# Altium footprint library Connector Header 254.PcbLib: 156 footprints (part 1 of 11)
Each footprint in its own frame and in the unit in brackets; x right, y up, seen from the top. Pads: shape width x height; smd on the part's side, far side on the other; paste and mask are expansions set on the pad; w line width, h text height; cw(c..) or ccw(c..) is an arc to the next point about the centre after c.
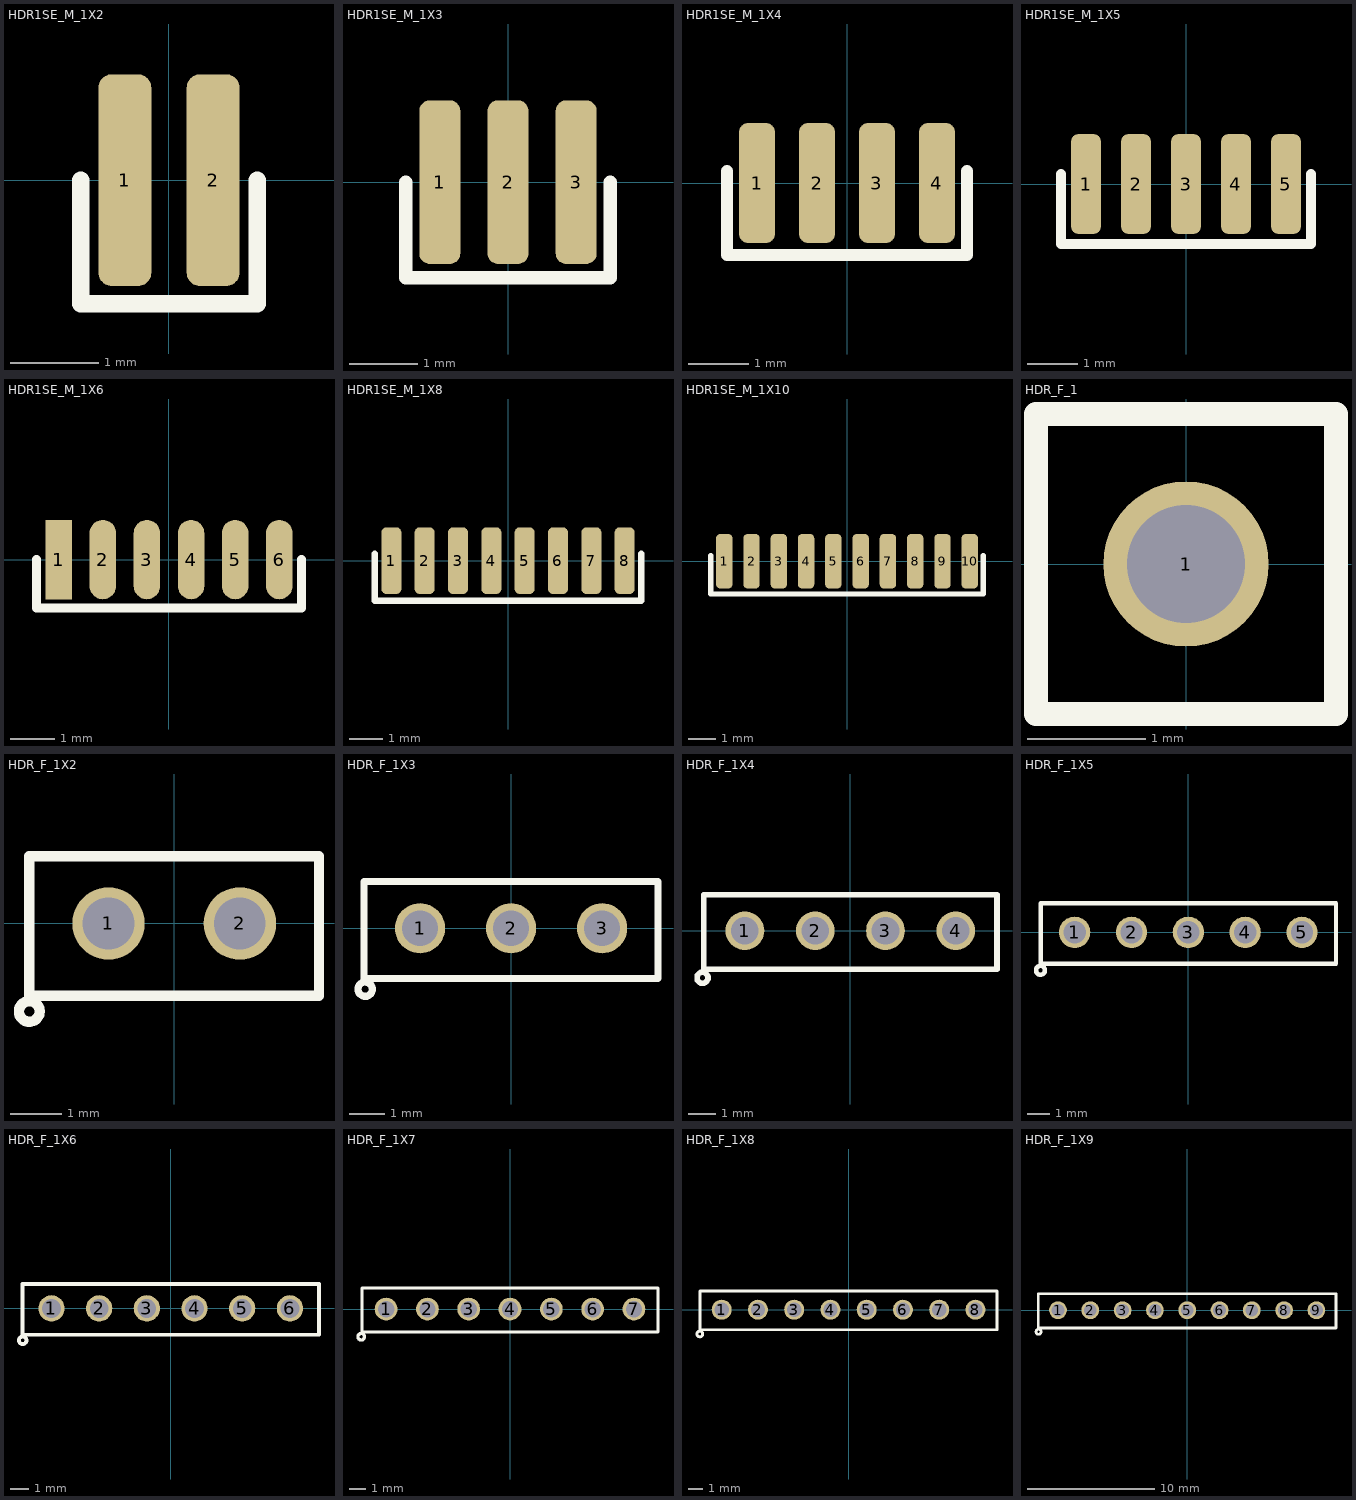
[diagram p0: the footprints below, top view; thin cyan lines are the x and y axes]

## HDR1SE_M_1X2 [mm] "HEADER, 1mm, test, SMD"
pads (2):
  rrect50% 0.6x2.4 smd mask+0.1: 1(-0.5,0) 2(0.5,0)
TopOverlay:
  lines w0.2: -1,0 -1,-1.4 1,-1.4 1,0

## HDR1SE_M_1X3 [mm] "HEADER, 1mm, test, SMD"
pads (3):
  rrect50% 0.6x2.4 smd mask+0.1: 1(-1,0) 2(0,0) 3(1,0)
TopOverlay:
  lines w0.2: -1.5,0 -1.5,-1.4 1.5,-1.4 1.5,0

## HDR1SE_M_1X4 [mm] "HEADER, 1mm, test, SMD"
pads (4):
  rrect50% 0.6x2 smd mask+0.1: 1(-1.5,0) 2(-0.5,0) 3(0.5,0) 4(1.5,0)
TopOverlay:
  lines w0.2: -2,0.2 -2,-1.2 2,-1.2 2,0.2

## HDR1SE_M_1X5 [mm] "HEADER, 1mm, test, SMD"
pads (5):
  rrect50% 0.6x2 smd mask+0.1: 1(-2,0) 2(-1,0) 3(0,0) 4(1,0) 5(2,0)
TopOverlay:
  lines w0.2: -2.5,0.2 -2.5,-1.2 2.5,-1.2 2.5,0.2

## HDR1SE_M_1X6 [mm] "1mm"
pads (6):
  rect 0.6x1.8 smd mask+0.1: 1(-2.5,0)
  oval 0.6x1.8 smd mask+0.1: 2(-1.5,0) 3(-0.5,0) 4(0.5,0) 5(1.5,0) 6(2.5,0)
TopOverlay:
  lines w0.2: -3,0 -3,-1.1 3,-1.1 3,0

## HDR1SE_M_1X8 [mm] "HEADER, 1mm, test, SMD"
pads (8):
  rrect50% 0.6x2 smd mask+0.1: 1(-3.5,0) 2(-2.5,0) 3(-1.5,0) 4(-0.5,0) 5(0.5,0) 6(1.5,0) 7(2.5,0) 8(3.5,0)
TopOverlay:
  lines w0.2: -4,0.2 -4,-1.2 4,-1.2 4,0.2

## HDR1SE_M_1X10 [mm] "HEADER, 1mm, test, SMD"
pads (10):
  rrect50% 0.6x2 smd mask+0.1: 1(-4.5,0) 2(-3.5,0) 3(-2.5,0) 4(-1.5,0) 5(-0.5,0) 6(0.5,0) 7(1.5,0) 8(2.5,0) 9(3.5,0) 10(4.5,0)
TopOverlay:
  lines w0.2: -5,0.2 -5,-1.2 5,-1.2 5,0.2

## HDR_F_1 [mm] "Connector; Header; 1 Position"
height 8
pads (1):
  round 1.4 / inner round 1.4 / far side oval 1.4x2.2 hole 1: 1(0,0)
TopOverlay:
  lines w0.2: -1.27,-1.27 -1.27,1.27 1.27,1.27 1.27,-1.27 -1.27,-1.27
3D body "PBS-1.stp": height 8.5, standoff -3.15, extent -1.27,-1.27 1.27,1.27

## HDR_F_1X2 [mm] "HEADER FEMALE pitch: 2.54mm"
pads (2):
  round 1.4 / inner round 1.4 / far side oval 1.4x2.2 hole 1 mask+0.1: 1(-1.27,0) 2(1.27,0)
TopOverlay:
  circle w0.2: c-2.8,-1.7 r0.2
  lines w0.2: -2.8,-1.4 2.8,-1.4 2.8,1.3 -2.8,1.3 -2.8,-1.4
3D body "female_header_a-bl254-eg-g02d.stp": height 8.5, standoff -3.2, extent -2.665,-1.3 2.665,1.2

## HDR_F_1X3 [mm] "HEADER FEMALE pitch: 2.54mm"
pads (3):
  round 1.4 / inner round 1.4 / far side oval 1.4x2.2 hole 1 mask+0.1: 1(-2.54,0) 2(0,0) 3(2.54,0)
TopOverlay:
  circle w0.2: c-4.07,-1.7 r0.2
  lines w0.2: -4.1,-1.4 -4.1,1.3 4.1,1.3 4.1,-1.4 -4.1,-1.4
3D body "female_header_a-bl254-eg-g03d.stp": height 8.5, standoff -3.2, extent -3.935,-1.3 3.935,1.2

## HDR_F_1X4 [mm] "HEADER FEMALE pitch: 2.54mm"
pads (4):
  round 1.4 / inner round 1.4 / far side oval 1.4x2.2 hole 1 mask+0.1: 1(-3.81,0) 2(-1.27,0) 3(1.27,0) 4(3.81,0)
TopOverlay:
  circle w0.2: c-5.34,-1.7 r0.2
  lines w0.2: -5.3,-1.4 5.3,-1.4 5.3,1.3 -5.3,1.3 -5.3,-1.4
3D body "female_header_a-bl254-eg-g02d.stp": height 8.5, standoff -3.2, extent -0.125,-1.3 5.205,1.2
3D body "female_header_a-bl254-eg-g02d.stp": height 8.5, standoff -3.2, extent -5.205,-1.3 0.125,1.2

## HDR_F_1X5 [mm] "HEADER FEMALE pitch: 2.54mm"
pads (5):
  round 1.4 / inner round 1.4 / far side oval 1.4x2.2 hole 1 mask+0.1: 1(-5.08,0) 2(-2.54,0) 3(0,0) 4(2.54,0) 5(5.08,0)
TopOverlay:
  circle w0.2: c-6.61,-1.7 r0.2
  lines w0.2: -6.6,-1.4 6.6,-1.4 6.6,1.3 -6.6,1.3 -6.6,-1.4
3D body "female_header_a-bl254-eg-g02d.stp": height 8.5, standoff -3.2, extent 1.145,-1.3 6.475,1.2
3D body "female_header_a-bl254-eg-g03d.stp": height 8.5, standoff -3.2, extent -6.475,-1.3 1.395,1.2

## HDR_F_1X6 [mm] "HEADER FEMALE pitch: 2.54mm"
pads (6):
  round 1.4 / inner round 1.4 / far side oval 1.4x2.2 hole 1 mask+0.1: 1(-6.35,0) 2(-3.81,0) 3(-1.27,0) 4(1.27,0) 5(3.81,0) 6(6.35,0)
TopOverlay:
  circle w0.2: c-7.88,-1.7 r0.2
  lines w0.2: -7.9,-1.4 7.9,-1.4 7.9,1.3 -7.9,1.3 -7.9,-1.4
3D body "female_header_a-bl254-eg-g03d.stp": height 8.5, standoff -3.2, extent -0.125,-1.3 7.745,1.2
3D body "female_header_a-bl254-eg-g03d.stp": height 8.5, standoff -3.2, extent -7.745,-1.3 0.125,1.2

## HDR_F_1X7 [mm] "HEADER FEMALE pitch: 2.54mm"
pads (7):
  round 1.4 / inner round 1.4 / far side oval 1.4x2.2 hole 1 mask+0.1: 1(-7.62,0) 2(-5.08,0) 3(-2.54,0) 4(0,0) 5(2.54,0) 6(5.08,0) 7(7.62,0)
TopOverlay:
  circle w0.2: c-9.15,-1.7 r0.2
  lines w0.2: -9.1,-1.4 9.1,-1.4 9.1,1.3 -9.1,1.3 -9.1,-1.4
3D body "female_header_a-bl254-eg-g02d.stp": height 8.5, standoff -3.2, extent -1.395,-1.3 3.935,1.2
3D body "female_header_a-bl254-eg-g03d.stp": height 8.5, standoff -3.2, extent -9.015,-1.3 -1.145,1.2
3D body "female_header_a-bl254-eg-g02d.stp": height 8.5, standoff -3.2, extent 3.685,-1.3 9.015,1.2

## HDR_F_1X8 [mm] "HEADER FEMALE pitch: 2.54mm"
pads (8):
  round 1.4 / inner round 1.4 / far side oval 1.4x2.2 hole 1 mask+0.1: 1(-8.89,0) 2(-6.35,0) 3(-3.81,0) 4(-1.27,0) 5(1.27,0) 6(3.81,0) 7(6.35,0) 8(8.89,0)
TopOverlay:
  circle w0.2: c-10.42,-1.7 r0.2
  lines w0.2: -10.4,-1.4 -10.4,1.3 10.4,1.3 10.4,-1.4 -10.4,-1.4
3D body "female_header_a-bl254-eg-g02d.stp": height 8.5, standoff -3.2, extent 4.955,-1.3 10.285,1.2
3D body "female_header_a-bl254-eg-g03d.stp": height 8.5, standoff -3.2, extent -10.285,-1.3 -2.415,1.2
3D body "female_header_a-bl254-eg-g03d.stp": height 8.5, standoff -3.2, extent -2.665,-1.3 5.205,1.2

## HDR_F_1X9 [mm] "HEADER FEMALE pitch: 2.54mm"
pads (9):
  round 1.4 / inner round 1.4 / far side oval 1.4x2.2 hole 1 mask+0.1: 1(-10.16,0) 2(-7.62,0) 3(-5.08,0) 4(-2.54,0) 5(0,0) 6(2.54,0) 7(5.08,0) 8(7.62,0) 9(10.16,0)
TopOverlay:
  circle w0.2: c-11.69,-1.7 r0.2
  lines w0.2: -11.7,-1.4 11.7,-1.4 11.7,1.3 -11.7,1.3 -11.7,-1.4
3D body "female_header_a-bl254-eg-g03d.stp": height 8.5, standoff -3.2, extent 3.685,-1.3 11.555,1.2
3D body "female_header_a-bl254-eg-g03d.stp": height 8.5, standoff -3.2, extent -3.935,-1.3 3.935,1.2
3D body "female_header_a-bl254-eg-g03d.stp": height 8.5, standoff -3.2, extent -11.555,-1.3 -3.685,1.2